# Altium schematic symbol library TLP182BL-TPL,E.SchLib: 1 symbol
Pins are listed as number, name and electrical type; pins without a type are passive.

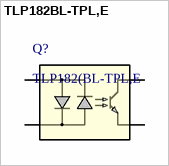
[diagram p0: symbol TLP182BL-TPL,E]

## TLP182BL-TPL,E
designator Q?, comment TLP182(BL-TPL,E
Photocoupler (phototransistor output), AC input, 3750 Vrms, 4pin SO6; Manufacturer_Name: Toshiba Electronic Devices & Storage Corp.; Number_devices_in_Package: 1; Copyright: Copyright (C) 2025 Ultra Librarian. All rights reserved.; Manufacturer_Part_Number: TLP182(BL-TPL,E; Source_Package: TLP182; RefDes: Refdes; Type: Type
footprint 4pin SO6_TOS
pins: 1 Anode/Cathode, 3 Cathode/Anode, 4 Emitter, 6 Collector